# EAGLE library part AM26LS32ACDR (library AM26LS32ACDR)
Quadruple Differential Line Receivers Source: Datasheet <http://www.ti.com/lit/gpn/am26ls32ac>
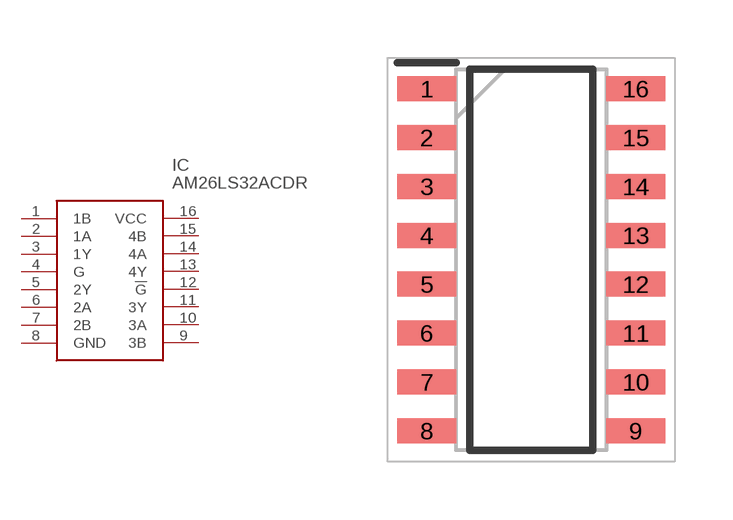
[diagram p0: symbol with the pads of SOIC127P600X175-16N; footprint SOIC127P600X175-16N]

Designator prefix IC

## AM26LS32ACDR (Description: Quadruple Differential Line Receivers; Height: 1.75mm; Manufacturer_Name: Texas Instruments; Manufacturer_Part_Number: AM26LS32ACDR)  [SOIC127P600X175-16N]
1  1B
2  1A
3  1Y
4  G
5  2Y
6  2A
7  2B
8  GND
9  3B
10  3A
11  3Y
12  !G
13  4Y
14  4A
15  4B
16  VCC

## Footprint SOIC127P600X175-16N (pad centres in mm)
D (R-PDSO-G16)
smd 1.525 x 0.65: 1 -2.712,4.445; 2 -2.712,3.175; 3 -2.712,1.905; 4 -2.712,0.635; 5 -2.712,-0.635; 6 -2.712,-1.905; 7 -2.712,-3.175; 8 -2.712,-4.445; 9 2.712,-4.445; 10 2.712,-3.175; 11 2.712,-1.905; 12 2.712,-0.635; 13 2.712,0.635; 14 2.712,1.905; 15 2.712,3.175; 16 2.712,4.445